# Altium footprint library Connector-USB.PcbLib: 42 footprints (part 1 of 3)
Each footprint in its own frame and in the unit in brackets; x right, y up, seen from the top. Pads: shape width x height; smd on the part's side, far side on the other; paste and mask are expansions set on the pad; w line width, h text height; cw(c..) or ccw(c..) is an arc to the next point about the centre after c.
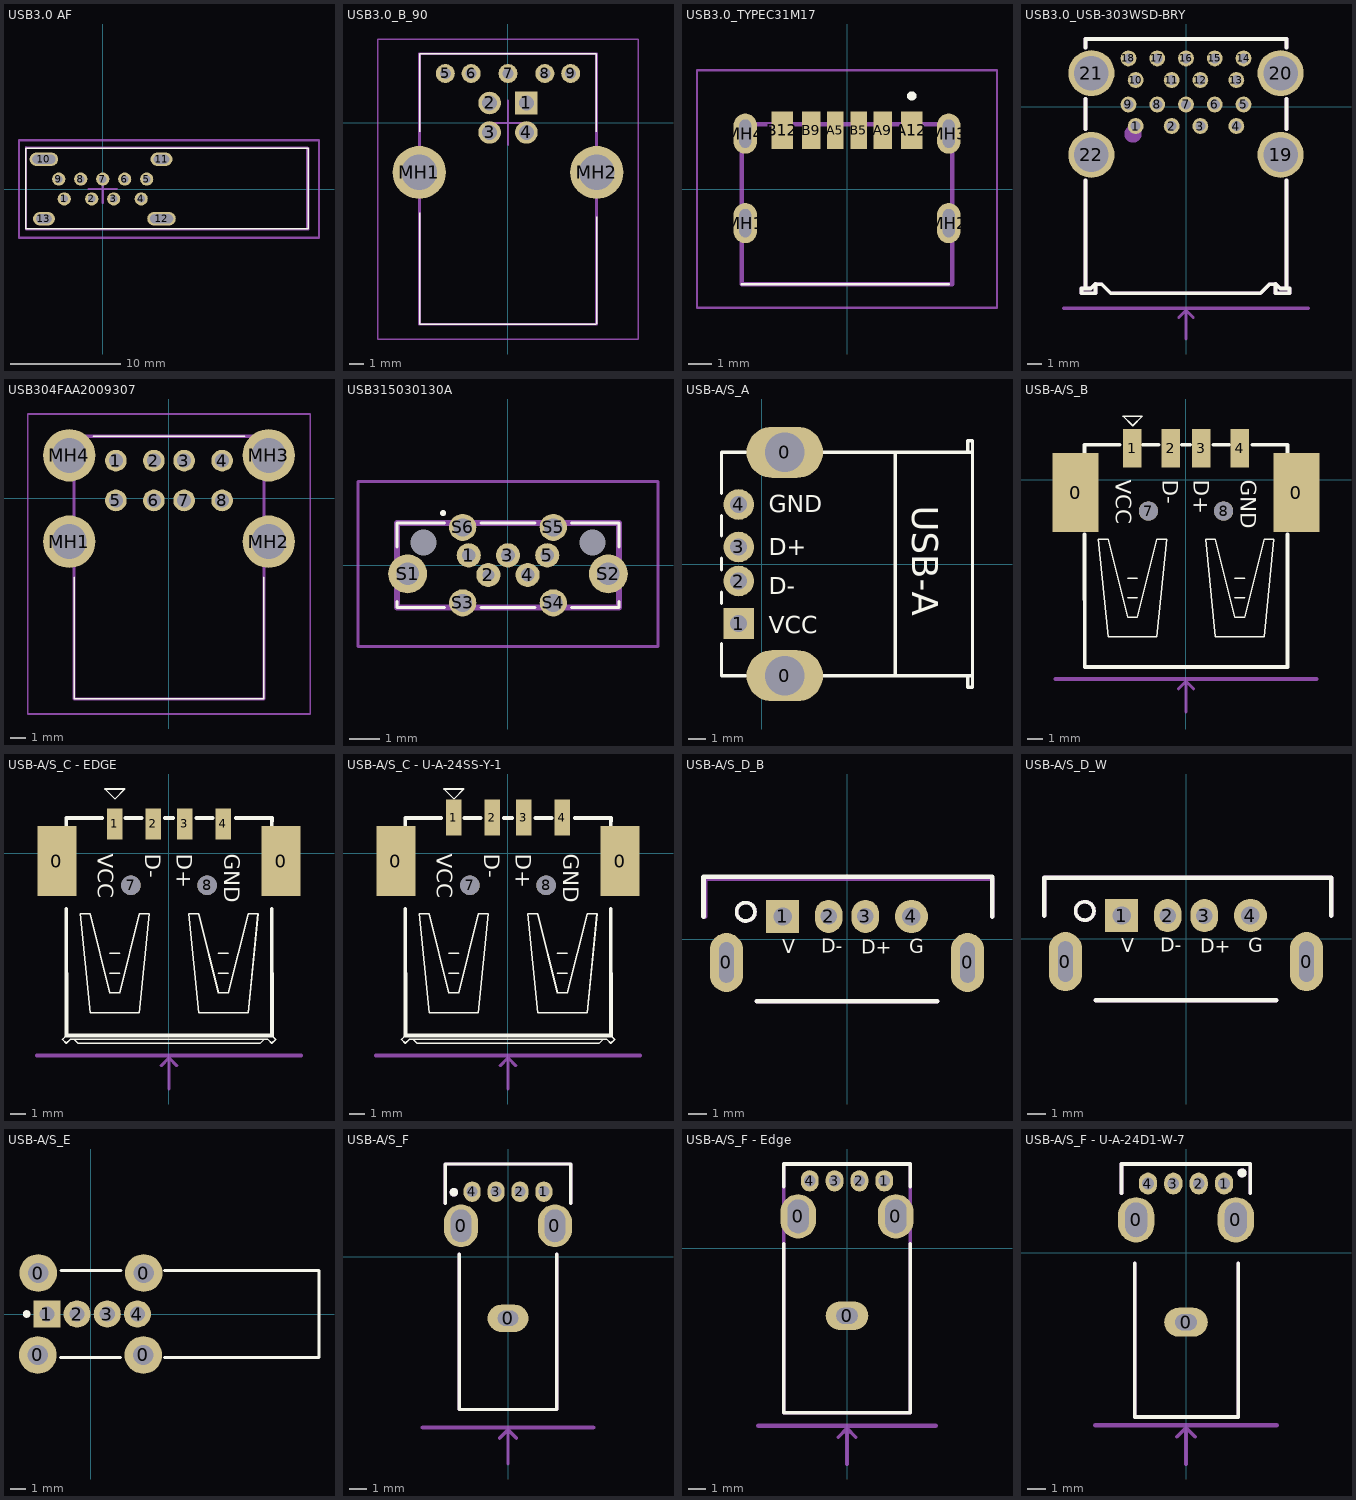
[diagram p0: the footprints below, top view; thin cyan lines are the x and y axes]

## USB3.0 AF [mm]
pads (13):
  round 1.2 hole 0.7: 1(-3.5,-0.9) 2(-1,-0.9) 3(1,-0.9) 4(3.5,-0.9) 5(4,0.9) 6(2,0.9) 7(0,0.9) 8(-2,0.9) 9(-4,0.9)
  oval 2.6x1.2 hole 0.8 slot 2.1 at 0 deg: 10(-5.35,2.71) 12(5.35,-2.71)
  oval 2x1.2 hole 0.8 slot 1.4 at 0 deg: 11(5.35,2.71) 13(-5.35,-2.71)
Top Overlay:
  lines w0.152: -7,-3.62 -7,3.7 18.7,3.7 18.7,-3.62 -7,-3.62
Top Value:
  text "'.Comment'" at -4.314,-0.581 h2
Top Designator:
  text "'.Designator'" at -5.721,-0.419 h2
Top Courtyard:
  lines w0.2: -1.27,0 1.27,0 ; 0,-1.27 0,1.27 ; -7.62,-4.445 -7.62,4.445 19.685,4.445 19.685,-4.445 -7.62,-4.445
Bottom Courtyard:
  lines w0.152: -7,-3.683 -7,3.75 18.75,3.75 18.75,-3.683 -7,-3.683
Top Assembly (Mech20):
  lines w0.2: -6.985,3.75 18.609,3.75 18.609,-3.683 -6.985,-3.683 -6.985,3.81
3D body "usb_3_a_90_v.stp": height 14.4, standoff -3.81, extent -7.05,-3.62 18.65,3.7

## USB3.0_B_90 [mm] "USB3.0 B型母座 蓝色 铜壳 弯脚 90度"
pads (11):
  rect 1.53x1.53 hole 1.02: 1(1.25,1.355)
  round 1.53 hole 1.02: 2(-1.25,1.355) 3(-1.25,-0.645) 4(1.25,-0.645)
  round 1.286 hole 0.75: 5(-4.25,3.355) 6(-2.5,3.355) 7(0,3.355) 8(2.5,3.355) 9(4.25,3.355)
  round 3.6 hole 2.4: MH1(-6.02,-3.355) MH2(6.02,-3.355)
Top Overlay:
  lines w0.1: -6,-13.655 -6,-6.105 -6,-13.655 ; -6,-13.655 6,-13.655 -6,-13.655 ; -6,4.695 6,4.695 ; -6,4.695 6,4.695 ; -6,4.695 -6,-0.605 -6,4.695 ; 6,4.695 6,-0.605 6,4.695 ; 6.02,-13.605 6.02,-6.355 6.02,-13.605
Top Component Outline:
  lines w0.2: -6,-13.655 -6,4.695 6,4.695 6,-13.655 -6,-13.655
Top Component Center:
  lines w0.152: -1.5,0 1.5,0 ; 0,-1.5 0,1.5
Top Value:
  text "'.Comment'" at -4.386,-0.591 h2.03
Top Designator:
  text "'.Designator'" at -5.815,-0.426 h2.03
Top Assembly:
  lines w0.1: -8.82,-14.655 -8.82,5.695 8.82,5.695 8.82,-14.655 -8.82,-14.655
3D body "USB3.0-typeB.STEP": height 13.06, standoff -3.92, extent -6.35,-13.62 6.25,4.73

## USB3.0_TYPEC31M17 [mm]
pads (10):
  rect 0.7x1.6 smd: A5(-0.5,2.5) B5(0.5,2.5)
  rect 0.8x1.6 smd: A9(1.52,2.5) B9(-1.52,2.5)
  rect 0.9x1.6 smd: A12(2.75,2.5) B12(-2.75,2.5)
  oval 1x1.7 hole 0.5 slot 1.2 at 90 deg: MH1(-4.32,-1.45) MH2(4.32,-1.45) MH3(4.32,2.35) MH4(-4.32,2.35)
Top Overlay:
  lines w0.1: -4.47,-4.05 4.32,-4.05
  lines w0.2: 2.75,3.85 ccw(c2.75,3.95) 2.75,4.05 ccw(c2.75,3.95) 2.75,3.85
Top Component Outline:
  lines w0.2: -4.47,-4.05 4.47,-4.05 4.47,2.75 -4.47,2.75 -4.47,-4.05
Top Value:
  text "'.Comment'" at -4.314,-0.581 h2
Top Designator:
  text "'.Designator'" at -5.721,-0.419 h2
Top Courtyard:
  lines w0.1: -6.37,-5.05 6.37,-5.05 6.37,5.05 -6.37,5.05 -6.37,-5.05
3D body "type-c-31-m-17.stp": height 3.19, standoff -0.82, extent -4.47,-4.104 4.47,2.696

## USB3.0_USB-303WSD-BRY [mm] "XUNPU_USB-303WSD-BRY"
pads (22):
  round 1.1 hole 0.7 paste-2539.97 mask+0.05: 1(-3.5,-1.35) 2(-1,-1.35) 3(1,-1.35) 4(3.5,-1.35) 5(4,0.15) 6(2,0.15) 7(0,0.15) 8(-2,0.15) 9(-4,0.15) 10(-3.5,1.85) 11(-1,1.85) 12(1,1.85) 13(3.5,1.85) 14(4,3.35) 15(2,3.35) 16(0,3.35) 17(-2,3.35) 18(-4,3.35)
  round 3.2 hole 2.4 paste-2539.97 mask+0.05: 19(6.57,-3.35) 20(6.57,2.33) 21(-6.57,2.33) 22(-6.57,-3.35)
Top Overlay:
  lines w0.254: -6.985,-12.64 -6.985,-5.133 ; -6.985,-1.567 -6.985,0.547 ; -6.985,4.113 -6.985,4.699 6.985,4.699 6.985,4.113 ; -6.282,-12.307 -6.616,-12.64 -7.257,-12.64 -7.257,-12.97 -6.282,-12.97 -6.282,-12.343 -5.86,-12.343 -5.233,-12.97 5.068,-12.97 ; 5.168,-12.97 5.795,-12.343 6.217,-12.343 6.217,-12.97 7.192,-12.97 7.192,-12.64 6.551,-12.64 6.217,-12.307 ; 6.985,-12.64 6.985,-5.133 ; 6.985,-1.567 6.985,0.547
Top Component Center:
  circle w0.6: c-3.683,-1.905 r0.3
Top Value:
  text "'.Comment'" at -4.314,-0.581 h2
Top Designator:
  text "'.Designator'" at -5.721,-0.419 h2
Body Extra:
  lines w0.2: -0.5,-14.644 0,-14.144 ; 0,-16.144 0,-14.144 ; 0.5,-14.644 0,-14.144
  lines w0.254: -8.5,-14 8.5,-14
Top Assembly (Mech20):
  lines w0.254: -6.985,-12.64 -6.985,-5.133 ; -6.985,-1.567 -6.985,0.547 ; -6.985,4.113 -6.985,4.699 6.985,4.699 6.985,4.113 ; -6.282,-12.307 -6.616,-12.64 -7.257,-12.64 -7.257,-12.97 -6.282,-12.97 -6.282,-12.343 -5.86,-12.343 -5.233,-12.97 5.068,-12.97 ; 5.168,-12.97 5.795,-12.343 6.217,-12.343 6.217,-12.97 7.192,-12.97 7.192,-12.64 6.551,-12.64 6.217,-12.307 ; 6.985,-12.64 6.985,-5.133 ; 6.985,-1.567 6.985,0.547
3D body "USB-303WSD-BRY.step": height 16.15, standoff -3.17, extent -7.8,-12.95 7.8,4.55

## USB304FAA2009307 [mm]
pads (12):
  round 1.431 hole 0.92: 1(-3.5,2.49) 2(-1,2.49) 3(1,2.49) 4(3.5,2.49) 5(-3.5,-0.13) 6(-1,-0.13) 7(1,-0.13) 8(3.5,-0.13)
  round 3.45 hole 2.3: MH1(-6.57,-2.84) MH2(6.57,-2.84) MH3(6.57,2.84) MH4(-6.57,2.84)
Top Overlay:
  lines w0.1: -6.25,-5.2 -6.25,-13.2 6.25,-13.2 6.25,-5.2 ; -5,4.1 5,4.1
Top Component Outline:
  lines w0.2: -6.25,-13.2 -6.25,4.1 6.25,4.1 6.25,-13.2 -6.25,-13.2
Top Value:
  text "'.Comment'" at -4.314,-3.421 h2
Top Designator:
  text "'.Designator'" at -5.721,-3.259 h2
Bottom Courtyard:
  lines w0.1: -9.295,-14.2 -9.295,5.565 9.295,5.565 9.295,-14.2 -9.295,-14.2
  text "'.Designator'" at -4.5,-4.5 h1.52
3D body "USB AF 双层 DIP.stp": height 16.2, standoff -3.2, extent -7.906,-13.601 7.794,3.996

## USB315030130A [mm]
pads (13):
  round 0.8 hole 0.45: 1(-1.3,0.325) 3(0,0.325) 4(0.65,-0.325) 5(1.3,0.325)
  round 0.8 hole 0.4: 2(-0.65,-0.325)
  round 0.425 hole 0.85 unplated: MH1(-2.8,0.75) MH2(2.8,0.75)
  round 1.286 hole 0.75: S1(-3.325,-0.29) S2(3.325,-0.29)
  round 0.9 hole 0.6: S3(-1.5,-1.25) S4(1.5,-1.25) S5(1.5,1.25) S6(-1.5,1.25)
Top Overlay:
  lines w0.1: -3.675,-1.2 -3.675,-1.4 -2.1,-1.4 ; -3.675,0.6 -3.675,1.4 -2.1,1.4 ; -0.9,-1.4 0.9,-1.4 ; -0.9,1.4 0.9,1.4 ; 2.1,-1.4 3.675,-1.4 3.675,-1.2 ; 2.1,1.4 3.675,1.4 3.675,0.6 ; -2.2,1.725 cw(c-2.15,1.725) -2.1,1.725 cw(c-2.15,1.725) -2.2,1.725
Top Value:
  text "'.Comment'" at -4.314,-0.581 h2
Top Designator:
  text "'.Designator'" at -5.721,-0.419 h2
Body Extra:
  lines w0.2: -3.675,-1.4 3.675,-1.4 3.675,1.4 -3.675,1.4 -3.675,-1.4
Bottom Courtyard:
  lines w0.1: -4.968,-2.7 4.968,-2.7 4.968,2.775 -4.968,2.775 -4.968,-2.7
3D body "USB3150-30-075-AMicroUSB 公头.stp": height 7.5, standoff -0.88, extent -3.675,-1.459 3.675,1.341

## USB-A/S_A [mm]
height 7.01
pads (6):
  oval 4.5x3 hole 2.3: 0(1.355,-6.57) 0(1.355,6.57)
  rect 1.8x1.8 hole 1: 1(-1.355,-3.5)
  round 1.8 hole 1: 2(-1.355,-1) 3(-1.355,1) 4(-1.355,3.5)
Top Overlay:
  lines w0.2: -2.365,-4.7 -2.365,-6.565 -0.945,-6.565 ; -2.365,-2.3 -2.365,-1.66 ; -2.365,-0.34 -2.365,0.34 ; -2.365,1.66 -2.365,2.84 ; -2.365,4.16 -2.365,6.565 -0.945,6.565 ; 3.655,-6.565 12.397,-6.565 ; 3.655,6.565 12.397,6.565 ; 12.107,-6.565 12.107,-7.25 12.397,-7.25 12.397,7.25 12.107,7.25 12.107,6.565
  lines w0.203: 7.855,-6.565 7.855,6.565
  text "USB-A" at 8.855,3.43 h1.52
  text "VCC" at 0.423,-4.064 h1.02
  text "D-" at 0.423,-1.778 h1.02
  text "D+" at 0.423,0.508 h1.02
  text "GND" at 0.423,3.048 h1.02
Top Value:
  text "'.Comment'" at 5.83,-4.314 h2
Top Designator:
  text "'.Designator'" at 5.668,-5.721 h2
3D body "USB-A_SA.STEP": height 6.8, standoff -4.31, extent -1.903,-7.31 12.401,7.374

## USB-A/S_B [mm]
pads (8):
  rect 3x5.15 smd: 0(-7.2,-0.85) 0(7.2,-0.85)
  rect 1.2x2.5 smd: 1(-3.5,2.05) 2(-1,2.05) 3(1,2.05) 4(3.5,2.05)
  round 1.25 hole 1.25 unplated: 7(-2.45,-2.05) 8(2.45,-2.05)
Top Overlay:
  lines w0.1: -3.803,-7.699 -3.168,-7.699 ; -3.803,-6.429 -3.168,-6.429 ; 3.182,-7.699 3.817,-7.699 ; 3.182,-6.429 3.817,-6.429 ; -5.708,-3.889 -5.073,-3.889 -3.803,-8.969 -3.168,-8.969 -1.898,-3.889 -1.263,-3.889 -1.898,-10.239 -5.073,-10.239 -5.708,-3.889 ; -4.113,4.14 -2.843,4.14 -3.478,3.505 -4.113,4.14 ; 1.277,-3.889 1.912,-3.889 3.182,-8.969 3.817,-8.969 5.087,-3.889 5.722,-3.889 5.087,-10.239 1.912,-10.239 1.277,-3.889
  lines w0.254: -6.604,-3.574 -6.597,-12.21 6.611,-12.21 6.604,-3.574 ; -6.604,1.76 -6.604,2.268 -4.318,2.268 ; -2.794,2.268 -1.778,2.268 ; -0.254,2.268 0.254,2.268 ; 1.778,2.268 2.794,2.268 ; 4.318,2.268 6.611,2.268 6.604,1.76
  text "VCC" at -4.572,-0.018 h1.02
  text "D-" at -1.524,-0.018 h1.02
  text "D+" at 0.508,-0.018 h1.02
  text "GND" at 3.556,-0.018 h1.02
Top Value:
  text "'.Comment'" at -4.314,-0.581 h2
Top Designator:
  text "'.Designator'" at -5.721,-0.419 h2
Body Extra:
  lines w0.2: -0.5,-13.644 0,-13.144 ; 0,-15.144 0,-13.144 ; 0.5,-13.644 0,-13.144
  lines w0.254: -8.5,-13 8.5,-13
3D body "USB-A_S-B.STEP": height 6.9, standoff -0.55, extent -7.821,-11.92 7.679,2.78

## USB-A/S_C - EDGE [mm] "904-131A2032S10100 (精拓金)"
pads (8):
  rect 2.5x4.5 smd: 0(-7.2,-0.5) 0(7.2,-0.5)
  rect 1x2 smd: 1(-3.5,1.9) 2(-1,1.9) 3(1,1.9) 4(3.5,1.9)
  round 1.25 hole 1.25 unplated: 7(-2.45,-2.05) 8(2.45,-2.05)
Top Overlay:
  lines w0.1: -6.597,-11.702 -6.851,-11.956 -6.597,-12.21 -6.343,-11.956 -6.089,-11.956 ; -3.803,-7.699 -3.168,-7.699 ; -3.803,-6.429 -3.168,-6.429 ; 3.182,-7.699 3.817,-7.699 ; 3.182,-6.429 3.817,-6.429 ; 6.611,-11.702 6.865,-11.956 6.611,-12.21 6.357,-11.956 6.103,-11.956 ; -6.089,-11.956 -5.835,-12.216 5.849,-12.216 6.103,-11.956 ; -6.089,-11.956 6.103,-11.956 ; -5.708,-3.889 -5.073,-10.239 -1.898,-10.239 -1.263,-3.889 -1.898,-3.889 -3.168,-8.969 -3.803,-8.969 -5.073,-3.889 -5.708,-3.889 ; -4.113,4.14 -3.478,3.505 -2.843,4.14 -4.113,4.14 ; 1.277,-3.889 1.912,-10.239 5.087,-10.239 5.722,-3.889 5.087,-3.889 3.817,-8.969 3.182,-8.969 1.912,-3.889 1.277,-3.889
  lines w0.254: -6.604,-3.574 -6.597,-11.702 ; -6.604,1.76 -6.604,2.268 -4.318,2.268 ; -6.597,-11.702 6.611,-11.702 ; -2.794,2.268 -1.778,2.268 ; -0.254,2.268 0.254,2.268 ; 1.778,2.268 2.794,2.268 ; 4.318,2.268 6.611,2.268 6.604,1.76 ; 6.604,-3.574 6.611,-11.702
  text "GND" at 3.556,-0.018 h1.02
  text "D+" at 0.508,-0.018 h1.02
  text "D-" at -1.524,-0.018 h1.02
  text "VCC" at -4.572,-0.018 h1.02
Top Value:
  text "'.Comment'" at -4.314,-0.581 h2
Top Designator:
  text "'.Designator'" at -5.721,-0.419 h2
Body Extra:
  lines w0.2: -0.5,-13.644 0,-13.144 ; 0,-15.144 0,-13.144 ; 0.5,-13.644 0,-13.144
  lines w0.254: -8.5,-13 8.5,-13
3D body "U-A-24SS-Y-1 v1.step": height 7.6, standoff -0.65, extent -8.093,-12.216 8.107,2.534

## USB-A/S_C - U-A-24SS-Y-1 [mm] "U-A-24SS-Y-1 (韩国韩荣)"
pads (8):
  rect 2.5x4.5 smd: 0(-7.2,-0.5) 0(7.2,-0.5)
  rect 1x2.3 smd: 1(-3.5,2.3) 2(-1,2.3) 3(1,2.3) 4(3.5,2.3)
  round 1.25 hole 1.25 unplated: 7(-2.45,-2.05) 8(2.45,-2.05)
Top Overlay:
  lines w0.1: -6.597,-11.702 -6.851,-11.956 -6.597,-12.21 -6.343,-11.956 -6.089,-11.956 ; -3.803,-7.699 -3.168,-7.699 ; -3.803,-6.429 -3.168,-6.429 ; 3.182,-7.699 3.817,-7.699 ; 3.182,-6.429 3.817,-6.429 ; 6.611,-11.702 6.865,-11.956 6.611,-12.21 6.357,-11.956 6.103,-11.956 ; -6.089,-11.956 -5.835,-12.216 5.849,-12.216 6.103,-11.956 ; -6.089,-11.956 6.103,-11.956 ; -5.708,-3.889 -5.073,-10.239 -1.898,-10.239 -1.263,-3.889 -1.898,-3.889 -3.168,-8.969 -3.803,-8.969 -5.073,-3.889 -5.708,-3.889 ; -4.113,4.14 -3.478,3.505 -2.843,4.14 -4.113,4.14 ; 1.277,-3.889 1.912,-10.239 5.087,-10.239 5.722,-3.889 5.087,-3.889 3.817,-8.969 3.182,-8.969 1.912,-3.889 1.277,-3.889
  lines w0.254: -6.604,-3.574 -6.597,-11.702 ; -6.604,1.76 -6.604,2.268 -4.318,2.268 ; -6.597,-11.702 6.611,-11.702 ; -2.794,2.268 -1.778,2.268 ; -0.254,2.268 0.254,2.268 ; 1.778,2.268 2.794,2.268 ; 4.318,2.268 6.611,2.268 6.604,1.76 ; 6.604,-3.574 6.611,-11.702
  text "GND" at 3.556,-0.018 h1.02
  text "D+" at 0.508,-0.018 h1.02
  text "D-" at -1.524,-0.018 h1.02
  text "VCC" at -4.572,-0.018 h1.02
Top Component Outline:
  lines w0.2: -0.5,-13.644 0,-13.144 ; 0,-15.144 0,-13.144 ; 0.5,-13.644 0,-13.144
  lines w0.254: -8.5,-13 8.5,-13
Top Value:
  text "'.Comment'" at -4.314,-0.581 h2
Top Designator:
  text "'.Designator'" at -5.721,-0.419 h2
3D body "U-A-24SS-Y-1.step": height 7.88, standoff -0.6, extent -8.093,-12.216 8.107,3.184

## USB-A/S_D_B [mm] "精拓金  916-252A1022Y10210"
pads (6):
  oval 1.8x3.2 hole 0.8 slot 2.2 at 90 deg: 0(-6.55,-1.25) 0(6.55,-1.25)
  rect 1.8x1.8 hole 1: 1(-3.5,1.25)
  oval 1.5x1.8 hole 0.9: 2(-1,1.25) 3(1,1.25)
  round 1.8 hole 1: 4(3.5,1.25)
Top Overlay:
  circle w0.2: c-5.5,1.5 r0.5
  lines w0.254: -7.8,1.25 -7.8,3.4 7.9,3.4 7.9,1.25 ; -4.9,-3.35 4.9,-3.35
  text "D-" at -1.404,-0.731 h0.76
  text "D+" at 0.781,-0.782 h0.76
  text "G" at 3.371,-0.757 h0.76
  text "V" at -3.512,-0.757 h0.76
Top Value:
  text "'.Comment'" at -4.314,-0.581 h2
Top Designator:
  text "'.Designator'" at -5.721,-0.419 h2
Top Assembly (Mech20):
  circle w0.2: c-5.5,1.5 r0.5
  lines w0.254: -7.7,1.25 -7.7,3.3 7.9,3.3 7.9,1.25 ; -4.9,-3.35 4.9,-3.35
3D body "916-252A1022Y10210.step": height 13.1, standoff -3.98, extent -7.805,-3.35 7.805,3.35

## USB-A/S_D_W [mm] "精拓金   916-252A1012Y10210"
pads (6):
  oval 1.8x3.2 hole 0.8 slot 2.2 at 90 deg: 0(-6.55,-1.25) 0(6.55,-1.25)
  rect 1.8x1.8 hole 1: 1(-3.5,1.25)
  oval 1.5x1.8 hole 0.9: 2(-1,1.25) 3(1,1.25)
  round 1.8 hole 1: 4(3.5,1.25)
Top Overlay:
  circle w0.2: c-5.5,1.5 r0.5
  lines w0.254: -7.7,1.25 -7.7,3.3 7.9,3.3 7.9,1.25 ; -4.9,-3.35 4.9,-3.35
  text "D-" at -1.404,-0.731 h0.76
  text "D+" at 0.781,-0.782 h0.76
  text "G" at 3.371,-0.757 h0.76
  text "V" at -3.512,-0.757 h0.76
Top Value:
  text "'.Comment'" at -4.314,-0.581 h2
Top Designator:
  text "'.Designator'" at -5.721,-0.419 h2
Top Assembly (Mech20):
  circle w0.2: c-5.5,1.5 r0.5
  lines w0.254: -7.7,1.25 -7.7,3.3 7.9,3.3 7.9,1.25 ; -4.9,-3.35 4.9,-3.35
3D body "916-252A1012Y10210.step": height 13.1, standoff -3.98, extent -7.805,-3.35 7.805,3.35

## USB-A/S_E [mm]
pads (8):
  round 2.5 hole 1.35: 0(-3.513,-2.718) 0(-3.487,2.718) 0(3.487,-2.718) 0(3.513,2.718)
  rect 1.8x1.8 hole 1: 1(-2.906,0)
  round 1.8 hole 1: 2(-0.906,0) 3(1.094,0) 4(3.094,0)
Top Overlay:
  circle w0.25: c-4.256,0 r0.125
  lines w0.2: -1.996,-2.878 1.97,-2.878 ; -1.97,2.878 1.996,2.878 ; 4.881,-2.88 15.146,-2.88 15.146,2.88 4.881,2.88
Top Value:
  text "'.Comment'" at -4.314,-0.581 h2
Top Designator:
  text "'.Designator'" at -5.721,-0.419 h2

## USB-A/S_F [mm] "USB-265-BRW 侧插 不带卷边"
pads (7):
  oval 2x2.5 hole 1.2 slot 1.9 at 90 deg: 0(-2.75,1.825) 0(2.75,1.825)
  oval 2.4x1.6 hole 0.9 slot 1.2 at 0 deg: 0(0,-3.6)
  oval 1x1.2 hole 0.65: 1(2.1,3.825) 2(0.7,3.825) 3(-0.7,3.825) 4(-2.1,3.825)
Top Overlay:
  circle w0.25: c-3.173,3.795 r0.125
  circle w0.25: c-3.173,3.795 r0.125
  lines w0.2: -3.683,3.142 -3.683,5.425 ; -3.683,5.45 3.623,5.45 cw(c3.623,5.365) 3.683,5.425 3.683,3.142 ; -2.86,0.146 -2.86,-8.95 2.86,-8.95 2.86,0.146
Top Value:
  text "'.Comment'" at -0.436,3.24 h1.5
Top Designator:
  text "'.Designator'" at -0.314,4.296 h1.5
Body Extra:
  lines w0.2: -0.5,-10.644 0,-10.144 ; 0,-12.144 0,-10.144 ; 0.5,-10.644 0,-10.144
  lines w0.254: -5,-10 5,-10
Top Assembly (Mech20):
  circle w0.25: c-3.173,3.795 r0.125
  lines w0.2: -3.683,3.142 -3.683,5.45 3.683,5.45 3.683,3.142 ; -2.86,0.146 -2.86,-8.95 2.86,-8.95 2.86,0.146
3D body "USB-265-BRW.STEP": height 13.59, standoff -2.91, extent -3.547,-8.95 3.547,5.45

## USB-A/S_F - Edge [mm] "906-252A1012D10200（精拓金）"
pads (7):
  oval 2x2.5 hole 1.2 slot 1.9 at 90 deg: 0(-2.75,1.8) 0(2.75,1.8)
  oval 2.4x1.6 hole 0.9 slot 1.2 at 0 deg: 0(0,-3.8)
  oval 1x1.2 hole 0.65: 1(2.1,3.8) 2(0.7,3.8) 3(-0.7,3.8) 4(-2.1,3.8)
Top Overlay:
  lines w0.2: -3.56,0.25 -3.56,-9.25 3.56,-9.25 3.56,0.25 ; -3.56,3.473 -3.56,4.75 3.56,4.75 3.56,3.473
Top 3D Body:
  lines w0.2: -3.56,-9.25 -3.56,4.75 3.56,4.75 3.56,-9.25 -3.56,-9.25
Top Value:
  text "'.Comment'" at -0.436,3.215 h1.5
Top Designator:
  text "'.Designator'" at -0.314,4.271 h1.5
Body Extra:
  lines w0.2: -0.5,-10.644 0,-10.144 ; 0,-12.144 0,-10.144 ; 0.5,-10.644 0,-10.144
  lines w0.254: -5,-10 5,-10
Top Assembly (Mech20):
  lines w0.2: -3.56,-9.25 -3.56,4.75 3.56,4.75 3.56,-9.25 -3.56,-9.25
3D body "906-252A1012D10200 v1.step": height 14.35, standoff -3.05, extent -3.56,-9.25 3.56,4.75

## USB-A/S_F - U-A-24D1-W-7 [mm] "U-A-24D1-W-7(HRO) 无卷边  黑胶. AF 14.0 CC-T()"
pads (7):
  oval 2x2.5 hole 1.2 slot 1.9 at 90 deg: 0(-2.75,1.825) 0(2.75,1.825)
  oval 2.4x1.6 hole 0.9 slot 1.2 at 0 deg: 0(0,-3.825)
  oval 1x1.2 hole 0.65: 1(2.1,3.825) 2(0.7,3.825) 3(-0.7,3.825) 4(-2.1,3.825)
Top Overlay:
  circle w0.25: c3.091,4.411 r0.125
  lines w0.2: -3.559,3.3 -3.559,4.903 3.552,4.903 3.552,3.3 ; -2.83,-0.579 -2.83,-9.049 2.89,-9.049 2.89,-0.579
Top Value:
  text "'.Comment'" at -0.436,3.24 h1.5
Top Designator:
  text "'.Designator'" at -0.314,4.296 h1.5
Body Extra:
  lines w0.2: -0.5,-10.144 0,-9.644 ; 0,-11.644 0,-9.644 ; 0.5,-10.144 0,-9.644
  lines w0.254: -5,-9.5 5,-9.5
Top Assembly (Mech20):
  circle w0.25: c3.091,4.411 r0.125
  lines w0.2: -3.559,3.3 -3.559,4.903 3.552,4.903 3.552,3.3 ; -2.83,-0.579 -2.83,-9.049 2.89,-9.049 2.89,-0.579
3D body "AF 14.0 CC-T.step": height 13.65, standoff -3.39, extent -3.559,-9.05 3.559,4.951